# Altium footprint library Package_DFN_QFN.PcbLib: 735 footprints (part 20 of 46)
Each footprint in its own frame and in the unit in brackets; x right, y up, seen from the top. Pads: shape width x height; smd on the part's side, far side on the other; paste and mask are expansions set on the pad; w line width, h text height; cw(c..) or ccw(c..) is an arc to the next point about the centre after c.
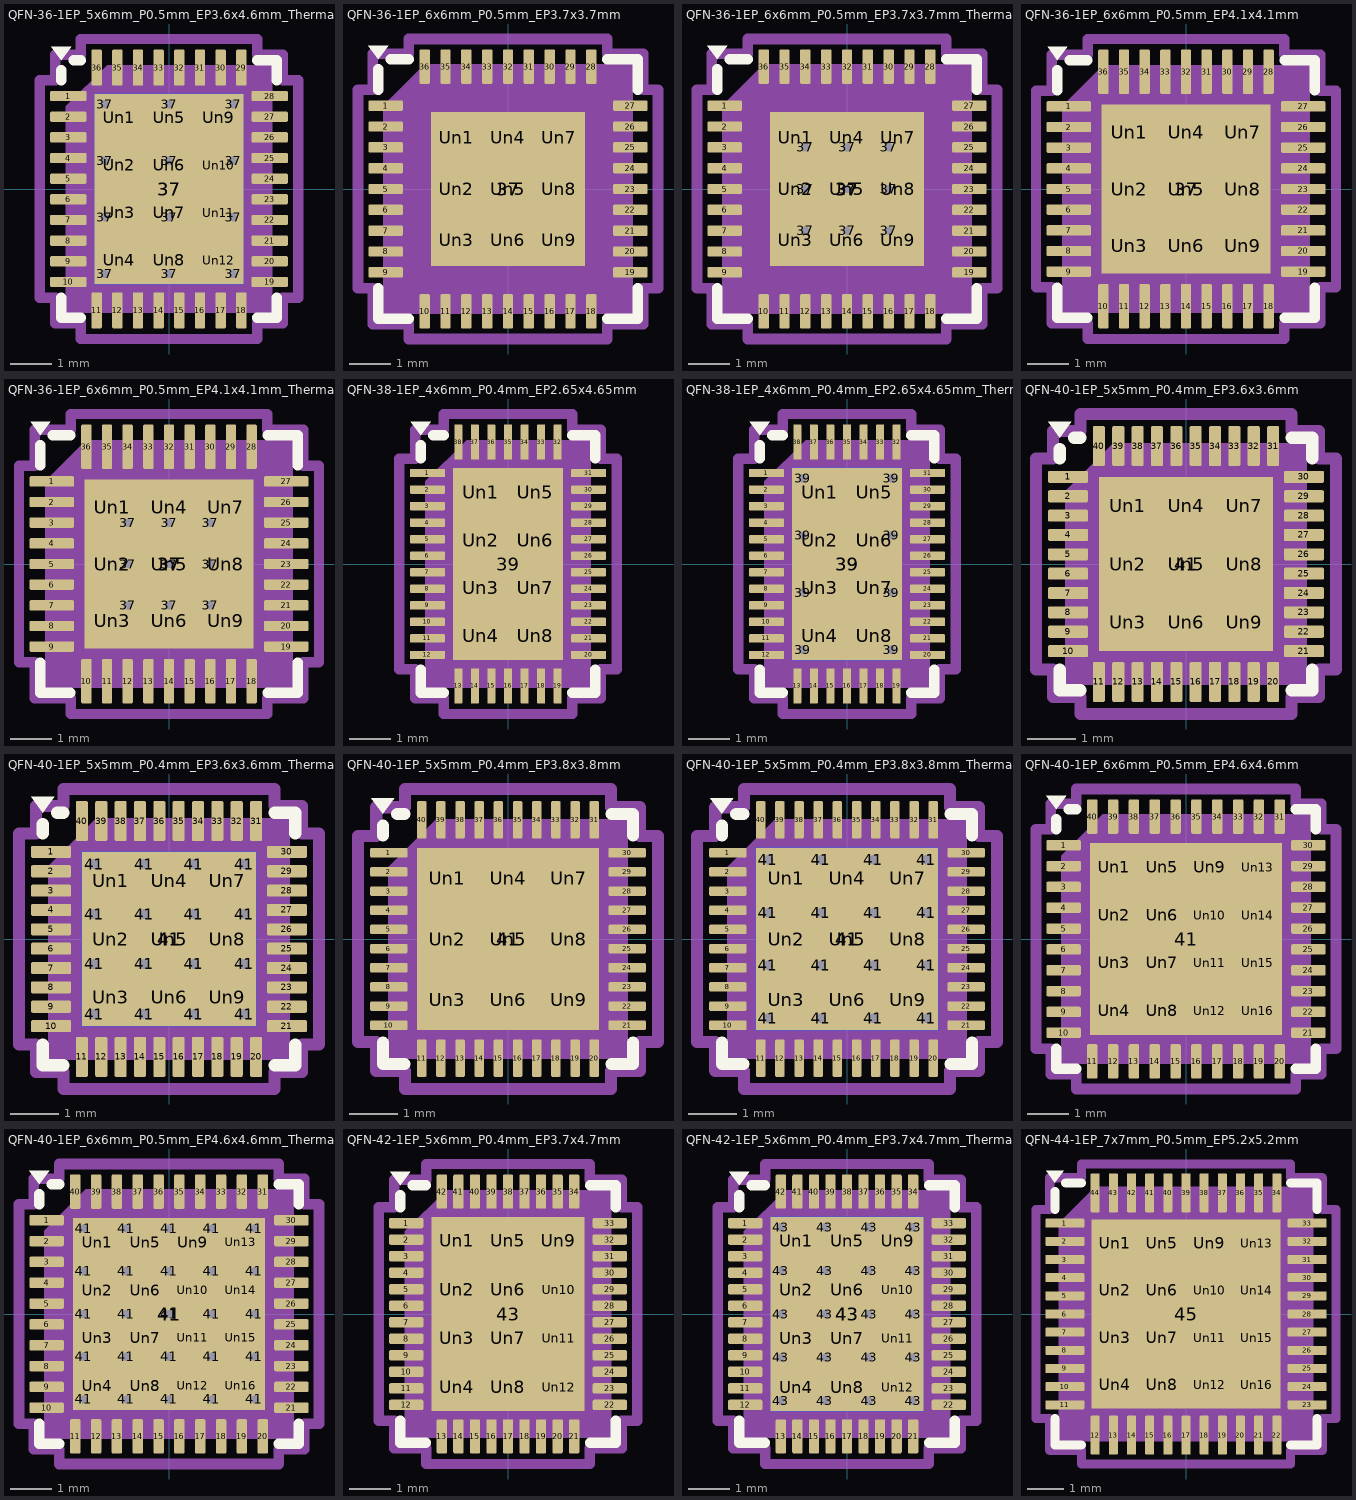
[diagram p19: the footprints below, top view; thin cyan lines are the x and y axes]

## QFN-36-1EP_5x6mm_P0.5mm_EP3.6x4.6mm_ThermalVias [mm] "QFN-36-1EP_5x6mm_P0.5mm_EP3.6x4.6mm_ThermalVias"
pads (62):
  rrect25% 0.875x0.25 smd: 1(-2.438,2.25) 2(-2.438,1.75) 3(-2.438,1.25) 4(-2.438,0.75) 5(-2.438,0.25) 6(-2.438,-0.25) 7(-2.438,-0.75) 8(-2.438,-1.25) 9(-2.438,-1.75) 10(-2.438,-2.25) 19(2.438,-2.25) 20(2.438,-1.75) 21(2.438,-1.25) 22(2.438,-0.75) 23(2.438,-0.25) 24(2.438,0.25) 25(2.438,0.75) 26(2.438,1.25) 27(2.438,1.75) 28(2.438,2.25)
  rrect25% 0.25x0.875 smd: 11(-1.75,-2.937) 12(-1.25,-2.937) 13(-0.75,-2.937) 14(-0.25,-2.937) 15(0.25,-2.937) 16(0.75,-2.937) 17(1.25,-2.937) 18(1.75,-2.937) 29(1.75,2.937) 30(1.25,2.937) 31(0.75,2.937) 32(0.25,2.937) 33(-0.25,2.937) 34(-0.75,2.937) 35(-1.25,2.937) 36(-1.75,2.937)
  round 0.5 hole 0.2: 37(-1.55,-2.05) 37(-1.55,-0.683) 37(-1.55,0.683) 37(-1.55,2.05) 37(0,-2.05) 37(0,-0.683) 37(0,0.683) 37(0,2.05) 37(1.55,-2.05) 37(1.55,-0.683) 37(1.55,0.683) 37(1.55,2.05)
  rect 3.6x4.6 smd: 37(0,0)
  rect 3.6x4.6 smd far side: 37(0,0)
  rrect25% 0.93x0.89 on Top Paste: Un1(-1.2,1.725) Un2(-1.2,0.575) Un3(-1.2,-0.575) Un4(-1.2,-1.725) Un5(0,1.725) Un6(0,0.575) Un7(0,-0.575) Un8(0,-1.725) Un9(1.2,1.725) Un10(1.2,0.575) Un11(1.2,-0.575) Un12(1.2,-1.725)
F.SilkS:
  region: -2.61,3.11 -2.85,3.44 -2.37,3.44
  lines w0.254: -2.61,-2.635 -2.61,-3.11 -2.135,-3.11 ; -2.61,2.635 -2.61,2.87 ; -2.31,3.11 -2.135,3.11 ; 2.135,-3.11 2.61,-3.11 2.61,-2.635 ; 2.135,3.11 2.61,3.11 2.61,2.635
Top Component Center:
  lines w0.127: -0.127,0 0.127,0 -0.127,0 ; 0,-0.127 0,0.127 0,-0.127
Top Assembly:
  region: 2.5,-3 -2.5,-3 -2.5,2 -1.5,3 2.5,3
Top Courtyard:
  lines w0.254: -3.13,-2.63 -3.13,2.63 -2.75,2.63 -2.75,3.25 -2.13,3.25 -2.13,3.63 2.13,3.63 2.13,3.25 2.75,3.25 2.75,2.63 3.13,2.63 3.13,-2.63 2.75,-2.63 2.75,-3.25 2.13,-3.25 2.13,-3.63 -2.13,-3.63 -2.13,-3.25 -2.75,-3.25 -2.75,-2.63 -3.13,-2.63
Top Designator:
  text ".Designator" at -3.43,-0.344 h1.52
3D body "QFN-36-1EP_5x6mm_P0.5mm_EP3.6x4.6mm.step": height 0.77, standoff 0, extent -2.5,-3 2.5,3

## QFN-36-1EP_6x6mm_P0.5mm_EP3.7x3.7mm [mm] "QFN-36-1EP_6x6mm_P0.5mm_EP3.7x3.7mm"
pads (46):
  rrect25% 0.825x0.25 smd: 1(-2.937,2) 2(-2.937,1.5) 3(-2.937,1) 4(-2.937,0.5) 5(-2.937,0) 6(-2.937,-0.5) 7(-2.937,-1) 8(-2.937,-1.5) 9(-2.937,-2) 19(2.937,-2) 20(2.937,-1.5) 21(2.937,-1) 22(2.937,-0.5) 23(2.937,0) 24(2.937,0.5) 25(2.937,1) 26(2.937,1.5) 27(2.937,2)
  rrect25% 0.25x0.825 smd: 10(-2,-2.937) 11(-1.5,-2.937) 12(-1,-2.937) 13(-0.5,-2.937) 14(0,-2.937) 15(0.5,-2.937) 16(1,-2.937) 17(1.5,-2.937) 18(2,-2.937) 28(2,2.937) 29(1.5,2.937) 30(1,2.937) 31(0.5,2.937) 32(0,2.937) 33(-0.5,2.937) 34(-1,2.937) 35(-1.5,2.937) 36(-2,2.937)
  rect 3.7x3.7 smd: 37(0,0)
  rrect25% 0.99x0.99 on Top Paste: Un1(-1.23,1.23) Un2(-1.23,0) Un3(-1.23,-1.23) Un4(0,1.23) Un5(0,0) Un6(0,-1.23) Un7(1.23,1.23) Un8(1.23,0) Un9(1.23,-1.23)
F.SilkS:
  region: -3.11,3.11 -3.35,3.44 -2.87,3.44
  lines w0.254: -3.11,-2.385 -3.11,-3.11 -2.385,-3.11 ; -3.11,2.385 -3.11,2.87 ; -2.81,3.11 -2.385,3.11 ; 2.385,-3.11 3.11,-3.11 3.11,-2.385 ; 2.385,3.11 3.11,3.11 3.11,2.385
Top Component Center:
  lines w0.127: -0.127,0 0.127,0 -0.127,0 ; 0,-0.127 0,0.127 0,-0.127
Top Assembly:
  region: 3,-3 -3,-3 -3,2 -2,3 3,3
Top Courtyard:
  lines w0.254: -3.6,-2.38 -3.25,-2.38 -3.25,-3.25 -2.38,-3.25 -2.38,-3.6 2.38,-3.6 2.38,-3.25 3.25,-3.25 3.25,-2.38 3.6,-2.38 3.6,2.38 3.25,2.38 3.25,3.25 2.38,3.25 2.38,3.6 -2.38,3.6 -2.38,3.25 -3.25,3.25 -3.25,2.38 -3.6,2.38 -3.6,-2.38
Top Designator:
  text ".Designator" at -3.43,-0.344 h1.52
3D body "QFN-36-1EP_6x6mm_P0.5mm_EP3.7x3.7mm.step": height 0.77, standoff 0, extent -3,-3 3,3

## QFN-36-1EP_6x6mm_P0.5mm_EP3.7x3.7mm_ThermalVias [mm] "QFN-36-1EP_6x6mm_P0.5mm_EP3.7x3.7mm_ThermalVias"
pads (56):
  rrect25% 0.825x0.25 smd: 1(-2.937,2) 2(-2.937,1.5) 3(-2.937,1) 4(-2.937,0.5) 5(-2.937,0) 6(-2.937,-0.5) 7(-2.937,-1) 8(-2.937,-1.5) 9(-2.937,-2) 19(2.937,-2) 20(2.937,-1.5) 21(2.937,-1) 22(2.937,-0.5) 23(2.937,0) 24(2.937,0.5) 25(2.937,1) 26(2.937,1.5) 27(2.937,2)
  rrect25% 0.25x0.825 smd: 10(-2,-2.937) 11(-1.5,-2.937) 12(-1,-2.937) 13(-0.5,-2.937) 14(0,-2.937) 15(0.5,-2.937) 16(1,-2.937) 17(1.5,-2.937) 18(2,-2.937) 28(2,2.937) 29(1.5,2.937) 30(1,2.937) 31(0.5,2.937) 32(0,2.937) 33(-0.5,2.937) 34(-1,2.937) 35(-1.5,2.937) 36(-2,2.937)
  round 0.5 hole 0.2: 37(-1,-1) 37(-1,0) 37(-1,1) 37(0,-1) 37(0,0) 37(0,1) 37(1,-1) 37(1,0) 37(1,1)
  rect 3.7x3.7 smd: 37(0,0)
  rect 2.5x2.5 smd far side: 37(0,0)
  rrect25% 0.99x0.99 on Top Paste: Un1(-1.23,1.23) Un2(-1.23,0) Un3(-1.23,-1.23) Un4(0,1.23) Un5(0,0) Un6(0,-1.23) Un7(1.23,1.23) Un8(1.23,0) Un9(1.23,-1.23)
F.SilkS:
  region: -3.11,3.11 -3.35,3.44 -2.87,3.44
  lines w0.254: -3.11,-2.385 -3.11,-3.11 -2.385,-3.11 ; -3.11,2.385 -3.11,2.87 ; -2.81,3.11 -2.385,3.11 ; 2.385,-3.11 3.11,-3.11 3.11,-2.385 ; 2.385,3.11 3.11,3.11 3.11,2.385
Top Component Center:
  lines w0.127: -0.127,0 0.127,0 -0.127,0 ; 0,-0.127 0,0.127 0,-0.127
Top Assembly:
  region: 3,-3 -3,-3 -3,2 -2,3 3,3
Top Courtyard:
  lines w0.254: -3.6,-2.38 -3.6,2.38 -3.25,2.38 -3.25,3.25 -2.38,3.25 -2.38,3.6 2.38,3.6 2.38,3.25 3.25,3.25 3.25,2.38 3.6,2.38 3.6,-2.38 3.25,-2.38 3.25,-3.25 2.38,-3.25 2.38,-3.6 -2.38,-3.6 -2.38,-3.25 -3.25,-3.25 -3.25,-2.38 -3.6,-2.38
Top Designator:
  text ".Designator" at -3.43,-0.344 h1.52
3D body "QFN-36-1EP_6x6mm_P0.5mm_EP3.7x3.7mm.step": height 0.77, standoff 0, extent -3,-3 3,3

## QFN-36-1EP_6x6mm_P0.5mm_EP4.1x4.1mm [mm] "QFN-36-1EP_6x6mm_P0.5mm_EP4.1x4.1mm"
pads (46):
  rrect25% 1.075x0.25 smd: 1(-2.838,2) 2(-2.838,1.5) 3(-2.838,1) 4(-2.838,0.5) 5(-2.838,0) 6(-2.838,-0.5) 7(-2.838,-1) 8(-2.838,-1.5) 9(-2.838,-2) 19(2.838,-2) 20(2.838,-1.5) 21(2.838,-1) 22(2.838,-0.5) 23(2.838,0) 24(2.838,0.5) 25(2.838,1) 26(2.838,1.5) 27(2.838,2)
  rrect25% 0.25x1.075 smd: 10(-2,-2.838) 11(-1.5,-2.838) 12(-1,-2.838) 13(-0.5,-2.838) 14(0,-2.838) 15(0.5,-2.838) 16(1,-2.838) 17(1.5,-2.838) 18(2,-2.838) 28(2,2.838) 29(1.5,2.838) 30(1,2.838) 31(0.5,2.838) 32(0,2.838) 33(-0.5,2.838) 34(-1,2.838) 35(-1.5,2.838) 36(-2,2.838)
  rect 4.1x4.1 smd: 37(0,0)
  rrect23% 1.1x1.1 on Top Paste: Un1(-1.37,1.37) Un2(-1.37,0) Un3(-1.37,-1.37) Un4(0,1.37) Un5(0,0) Un6(0,-1.37) Un7(1.37,1.37) Un8(1.37,0) Un9(1.37,-1.37)
F.SilkS:
  region: -3.11,3.11 -3.35,3.44 -2.87,3.44
  lines w0.254: -3.11,-2.385 -3.11,-3.11 -2.385,-3.11 ; -3.11,2.385 -3.11,2.87 ; -2.81,3.11 -2.385,3.11 ; 2.385,-3.11 3.11,-3.11 3.11,-2.385 ; 2.385,3.11 3.11,3.11 3.11,2.385
Top Component Center:
  lines w0.127: -0.127,0 0.127,0 -0.127,0 ; 0,-0.127 0,0.127 0,-0.127
Top Assembly:
  region: 3,-3 -3,-3 -3,2 -2,3 3,3
Top Courtyard:
  lines w0.254: -3.63,-2.38 -3.63,2.38 -3.25,2.38 -3.25,3.25 -2.38,3.25 -2.38,3.63 2.38,3.63 2.38,3.25 3.25,3.25 3.25,2.38 3.63,2.38 3.63,-2.38 3.25,-2.38 3.25,-3.25 2.38,-3.25 2.38,-3.63 -2.38,-3.63 -2.38,-3.25 -3.25,-3.25 -3.25,-2.38 -3.63,-2.38
Top Designator:
  text ".Designator" at -3.43,-0.344 h1.52
3D body "QFN-36-1EP_6x6mm_P0.5mm_EP3.7x3.7mm.step": height 0.77, standoff 0, extent -3,-3 3,3

## QFN-36-1EP_6x6mm_P0.5mm_EP4.1x4.1mm_ThermalVias [mm] "QFN-36-1EP_6x6mm_P0.5mm_EP4.1x4.1mm_ThermalVias"
pads (56):
  rrect25% 1.075x0.25 smd: 1(-2.838,2) 2(-2.838,1.5) 3(-2.838,1) 4(-2.838,0.5) 5(-2.838,0) 6(-2.838,-0.5) 7(-2.838,-1) 8(-2.838,-1.5) 9(-2.838,-2) 19(2.838,-2) 20(2.838,-1.5) 21(2.838,-1) 22(2.838,-0.5) 23(2.838,0) 24(2.838,0.5) 25(2.838,1) 26(2.838,1.5) 27(2.838,2)
  rrect25% 0.25x1.075 smd: 10(-2,-2.838) 11(-1.5,-2.838) 12(-1,-2.838) 13(-0.5,-2.838) 14(0,-2.838) 15(0.5,-2.838) 16(1,-2.838) 17(1.5,-2.838) 18(2,-2.838) 28(2,2.838) 29(1.5,2.838) 30(1,2.838) 31(0.5,2.838) 32(0,2.838) 33(-0.5,2.838) 34(-1,2.838) 35(-1.5,2.838) 36(-2,2.838)
  round 0.5 hole 0.2: 37(-1,-1) 37(-1,0) 37(-1,1) 37(0,-1) 37(0,0) 37(0,1) 37(1,-1) 37(1,0) 37(1,1)
  rect 4.1x4.1 smd: 37(0,0)
  rect 2.5x2.5 smd far side: 37(0,0)
  rrect23% 1.1x1.1 on Top Paste: Un1(-1.37,1.37) Un2(-1.37,0) Un3(-1.37,-1.37) Un4(0,1.37) Un5(0,0) Un6(0,-1.37) Un7(1.37,1.37) Un8(1.37,0) Un9(1.37,-1.37)
F.SilkS:
  region: -3.11,3.11 -3.35,3.44 -2.87,3.44
  lines w0.254: -3.11,-2.385 -3.11,-3.11 -2.385,-3.11 ; -3.11,2.385 -3.11,2.87 ; -2.81,3.11 -2.385,3.11 ; 2.385,-3.11 3.11,-3.11 3.11,-2.385 ; 2.385,3.11 3.11,3.11 3.11,2.385
Top Component Center:
  lines w0.127: -0.127,0 0.127,0 -0.127,0 ; 0,-0.127 0,0.127 0,-0.127
Top Assembly:
  region: 3,-3 -3,-3 -3,2 -2,3 3,3
Top Courtyard:
  lines w0.254: -3.63,-2.38 -3.63,2.38 -3.25,2.38 -3.25,3.25 -2.38,3.25 -2.38,3.63 2.38,3.63 2.38,3.25 3.25,3.25 3.25,2.38 3.63,2.38 3.63,-2.38 3.25,-2.38 3.25,-3.25 2.38,-3.25 2.38,-3.63 -2.38,-3.63 -2.38,-3.25 -3.25,-3.25 -3.25,-2.38 -3.63,-2.38
Top Designator:
  text ".Designator" at -3.43,-0.344 h1.52
3D body "QFN-36-1EP_6x6mm_P0.5mm_EP3.7x3.7mm.step": height 0.77, standoff 0, extent -3,-3 3,3

## QFN-38-1EP_4x6mm_P0.4mm_EP2.65x4.65mm [mm] "QFN-38-1EP_4x6mm_P0.4mm_EP2.65x4.65mm"
pads (47):
  rrect25% 0.85x0.2 smd: 1(-1.95,2.2) 2(-1.95,1.8) 3(-1.95,1.4) 4(-1.95,1) 5(-1.95,0.6) 6(-1.95,0.2) 7(-1.95,-0.2) 8(-1.95,-0.6) 9(-1.95,-1) 10(-1.95,-1.4) 11(-1.95,-1.8) 12(-1.95,-2.2) 20(1.95,-2.2) 21(1.95,-1.8) 22(1.95,-1.4) 23(1.95,-1) 24(1.95,-0.6) 25(1.95,-0.2) 26(1.95,0.2) 27(1.95,0.6) 28(1.95,1) 29(1.95,1.4) 30(1.95,1.8) 31(1.95,2.2)
  rrect25% 0.2x0.85 smd: 13(-1.2,-2.95) 14(-0.8,-2.95) 15(-0.4,-2.95) 16(0,-2.95) 17(0.4,-2.95) 18(0.8,-2.95) 19(1.2,-2.95) 32(1.2,2.95) 33(0.8,2.95) 34(0.4,2.95) 35(0,2.95) 36(-0.4,2.95) 37(-0.8,2.95) 38(-1.2,2.95)
  rect 2.65x4.65 smd: 39(0,0)
  rrect25% 1.07x0.94 on Top Paste: Un1(-0.66,1.74) Un2(-0.66,0.58) Un3(-0.66,-0.58) Un4(-0.66,-1.74) Un5(0.66,1.74) Un6(0.66,0.58) Un7(0.66,-0.58) Un8(0.66,-1.74)
F.SilkS:
  region: -2.11,3.11 -2.35,3.44 -1.87,3.44
  lines w0.254: -2.11,-2.56 -2.11,-3.11 -1.56,-3.11 ; -2.11,2.56 -2.11,2.87 ; -1.81,3.11 -1.56,3.11 ; 1.56,-3.11 2.11,-3.11 2.11,-2.56 ; 1.56,3.11 2.11,3.11 2.11,2.56
Top Component Center:
  lines w0.127: -0.127,0 0.127,0 -0.127,0 ; 0,-0.127 0,0.127 0,-0.127
Top Assembly:
  region: 2,-3 -2,-3 -2,2 -1,3 2,3
Top Courtyard:
  lines w0.254: -2.63,-2.55 -2.63,2.55 -2.25,2.55 -2.25,3.25 -1.55,3.25 -1.55,3.63 1.55,3.63 1.55,3.25 2.25,3.25 2.25,2.55 2.63,2.55 2.63,-2.55 2.25,-2.55 2.25,-3.25 1.55,-3.25 1.55,-3.63 -1.55,-3.63 -1.55,-3.25 -2.25,-3.25 -2.25,-2.55 -2.63,-2.55
Top Designator:
  text ".Designator" at -3.43,-0.344 h1.52
3D body "QFN-38-1EP_4x6mm_P0.4mm_EP2.65x4.65mm.step": height 0.77, standoff 0, extent -2,-3 2,3

## QFN-38-1EP_4x6mm_P0.4mm_EP2.65x4.65mm_ThermalVias [mm] "QFN-38-1EP_4x6mm_P0.4mm_EP2.65x4.65mm_ThermalVias"
pads (56):
  rrect25% 0.85x0.2 smd: 1(-1.95,2.2) 2(-1.95,1.8) 3(-1.95,1.4) 4(-1.95,1) 5(-1.95,0.6) 6(-1.95,0.2) 7(-1.95,-0.2) 8(-1.95,-0.6) 9(-1.95,-1) 10(-1.95,-1.4) 11(-1.95,-1.8) 12(-1.95,-2.2) 20(1.95,-2.2) 21(1.95,-1.8) 22(1.95,-1.4) 23(1.95,-1) 24(1.95,-0.6) 25(1.95,-0.2) 26(1.95,0.2) 27(1.95,0.6) 28(1.95,1) 29(1.95,1.4) 30(1.95,1.8) 31(1.95,2.2)
  rrect25% 0.2x0.85 smd: 13(-1.2,-2.95) 14(-0.8,-2.95) 15(-0.4,-2.95) 16(0,-2.95) 17(0.4,-2.95) 18(0.8,-2.95) 19(1.2,-2.95) 32(1.2,2.95) 33(0.8,2.95) 34(0.4,2.95) 35(0,2.95) 36(-0.4,2.95) 37(-0.8,2.95) 38(-1.2,2.95)
  round 0.5 hole 0.2: 39(-1.075,-2.075) 39(-1.075,-0.692) 39(-1.075,0.692) 39(-1.075,2.075) 39(1.075,-2.075) 39(1.075,-0.692) 39(1.075,0.692) 39(1.075,2.075)
  rect 2.65x4.65 smd: 39(0,0)
  rect 2.65x4.65 smd far side: 39(0,0)
  rrect25% 1.15x1.01 on Top Paste: Un1(-0.66,1.74) Un2(-0.66,0.58) Un3(-0.66,-0.58) Un4(-0.66,-1.74) Un5(0.66,1.74) Un6(0.66,0.58) Un7(0.66,-0.58) Un8(0.66,-1.74)
F.SilkS:
  region: -2.11,3.11 -2.35,3.44 -1.87,3.44
  lines w0.254: -2.11,-2.56 -2.11,-3.11 -1.56,-3.11 ; -2.11,2.56 -2.11,2.87 ; -1.81,3.11 -1.56,3.11 ; 1.56,-3.11 2.11,-3.11 2.11,-2.56 ; 1.56,3.11 2.11,3.11 2.11,2.56
Top Component Center:
  lines w0.127: -0.127,0 0.127,0 -0.127,0 ; 0,-0.127 0,0.127 0,-0.127
Top Assembly:
  region: 2,-3 -2,-3 -2,2 -1,3 2,3
Top Courtyard:
  lines w0.254: -2.63,-2.55 -2.63,2.55 -2.25,2.55 -2.25,3.25 -1.55,3.25 -1.55,3.63 1.55,3.63 1.55,3.25 2.25,3.25 2.25,2.55 2.63,2.55 2.63,-2.55 2.25,-2.55 2.25,-3.25 1.55,-3.25 1.55,-3.63 -1.55,-3.63 -1.55,-3.25 -2.25,-3.25 -2.25,-2.55 -2.63,-2.55
Top Designator:
  text ".Designator" at -3.43,-0.344 h1.52
3D body "QFN-38-1EP_4x6mm_P0.4mm_EP2.65x4.65mm.step": height 0.77, standoff 0, extent -2,-3 2,3

## QFN-40-1EP_5x5mm_P0.4mm_EP3.6x3.6mm [mm] "QFN-40-1EP_5x5mm_P0.4mm_EP3.6x3.6mm"
pads (50):
  rrect25% 0.825x0.25 smd: 1(-2.438,1.8) 2(-2.438,1.4) 3(-2.438,1) 4(-2.438,0.6) 5(-2.438,0.2) 6(-2.438,-0.2) 7(-2.438,-0.6) 8(-2.438,-1) 9(-2.438,-1.4) 10(-2.438,-1.8) 21(2.438,-1.8) 22(2.438,-1.4) 23(2.438,-1) 24(2.438,-0.6) 25(2.438,-0.2) 26(2.438,0.2) 27(2.438,0.6) 28(2.438,1) 29(2.438,1.4) 30(2.438,1.8)
  rrect25% 0.25x0.825 smd: 11(-1.8,-2.438) 12(-1.4,-2.438) 13(-1,-2.438) 14(-0.6,-2.438) 15(-0.2,-2.438) 16(0.2,-2.438) 17(0.6,-2.438) 18(1,-2.438) 19(1.4,-2.438) 20(1.8,-2.438) 31(1.8,2.438) 32(1.4,2.438) 33(1,2.438) 34(0.6,2.438) 35(0.2,2.438) 36(-0.2,2.438) 37(-0.6,2.438) 38(-1,2.438) 39(-1.4,2.438) 40(-1.8,2.438)
  rect 3.6x3.6 smd: 41(0,0)
  rrect25% 0.97x0.97 on Top Paste: Un1(-1.2,1.2) Un2(-1.2,0) Un3(-1.2,-1.2) Un4(0,1.2) Un5(0,0) Un6(0,-1.2) Un7(1.2,1.2) Un8(1.2,0) Un9(1.2,-1.2)
F.SilkS:
  region: -2.61,2.61 -2.85,2.94 -2.37,2.94
  lines w0.254: -2.61,-2.185 -2.61,-2.61 -2.185,-2.61 ; -2.61,2.185 -2.61,2.37 ; -2.31,2.61 -2.185,2.61 ; 2.185,-2.61 2.61,-2.61 2.61,-2.185 ; 2.185,2.61 2.61,2.61 2.61,2.185
Top Component Center:
  lines w0.127: -0.127,0 0.127,0 -0.127,0 ; 0,-0.127 0,0.127 0,-0.127
Top Assembly:
  region: 2.5,-2.5 -2.5,-2.5 -2.5,1.5 -1.5,2.5 2.5,2.5
Top Courtyard:
  lines w0.254: -3.1,-2.18 -3.1,2.18 -2.75,2.18 -2.75,2.75 -2.18,2.75 -2.18,3.1 2.18,3.1 2.18,2.75 2.75,2.75 2.75,2.18 3.1,2.18 3.1,-2.18 2.75,-2.18 2.75,-2.75 2.18,-2.75 2.18,-3.1 -2.18,-3.1 -2.18,-2.75 -2.75,-2.75 -2.75,-2.18 -3.1,-2.18
Top Designator:
  text ".Designator" at -3.43,-0.344 h1.52
3D body "QFN-40-1EP_5x5mm_P0.4mm_EP3.6x3.6mm.step": height 0.77, standoff 0, extent -2.5,-2.5 2.5,2.5

## QFN-40-1EP_5x5mm_P0.4mm_EP3.6x3.6mm_ThermalVias [mm] "QFN-40-1EP_5x5mm_P0.4mm_EP3.6x3.6mm_ThermalVias"
pads (67):
  rrect25% 0.825x0.25 smd: 1(-2.438,1.8) 2(-2.438,1.4) 3(-2.438,1) 4(-2.438,0.6) 5(-2.438,0.2) 6(-2.438,-0.2) 7(-2.438,-0.6) 8(-2.438,-1) 9(-2.438,-1.4) 10(-2.438,-1.8) 21(2.438,-1.8) 22(2.438,-1.4) 23(2.438,-1) 24(2.438,-0.6) 25(2.438,-0.2) 26(2.438,0.2) 27(2.438,0.6) 28(2.438,1) 29(2.438,1.4) 30(2.438,1.8)
  rrect25% 0.25x0.825 smd: 11(-1.8,-2.438) 12(-1.4,-2.438) 13(-1,-2.438) 14(-0.6,-2.438) 15(-0.2,-2.438) 16(0.2,-2.438) 17(0.6,-2.438) 18(1,-2.438) 19(1.4,-2.438) 20(1.8,-2.438) 31(1.8,2.438) 32(1.4,2.438) 33(1,2.438) 34(0.6,2.438) 35(0.2,2.438) 36(-0.2,2.438) 37(-0.6,2.438) 38(-1,2.438) 39(-1.4,2.438) 40(-1.8,2.438)
  round 0.5 hole 0.2: 41(-1.55,-1.55) 41(-1.55,-0.517) 41(-1.55,0.517) 41(-1.55,1.55) 41(-0.517,-1.55) 41(-0.517,-0.517) 41(-0.517,0.517) 41(-0.517,1.55) 41(0.517,-1.55) 41(0.517,-0.517) 41(0.517,0.517) 41(0.517,1.55) 41(1.55,-1.55) 41(1.55,-0.517) 41(1.55,0.517) 41(1.55,1.55)
  rect 3.6x3.6 smd: 41(0,0)
  rect 3.6x3.6 smd far side: 41(0,0)
  rrect25% 0.93x0.93 on Top Paste: Un1(-1.2,1.2) Un2(-1.2,0) Un3(-1.2,-1.2) Un4(0,1.2) Un5(0,0) Un6(0,-1.2) Un7(1.2,1.2) Un8(1.2,0) Un9(1.2,-1.2)
F.SilkS:
  region: -2.61,2.61 -2.85,2.94 -2.37,2.94
  lines w0.254: -2.61,-2.185 -2.61,-2.61 -2.185,-2.61 ; -2.61,2.185 -2.61,2.37 ; -2.31,2.61 -2.185,2.61 ; 2.185,-2.61 2.61,-2.61 2.61,-2.185 ; 2.185,2.61 2.61,2.61 2.61,2.185
Top Component Center:
  lines w0.127: -0.127,0 0.127,0 -0.127,0 ; 0,-0.127 0,0.127 0,-0.127
Top Assembly:
  region: 2.5,-2.5 -2.5,-2.5 -2.5,1.5 -1.5,2.5 2.5,2.5
Top Courtyard:
  lines w0.254: -3.1,-2.18 -3.1,2.18 -2.75,2.18 -2.75,2.75 -2.18,2.75 -2.18,3.1 2.18,3.1 2.18,2.75 2.75,2.75 2.75,2.18 3.1,2.18 3.1,-2.18 2.75,-2.18 2.75,-2.75 2.18,-2.75 2.18,-3.1 -2.18,-3.1 -2.18,-2.75 -2.75,-2.75 -2.75,-2.18 -3.1,-2.18
Top Designator:
  text ".Designator" at -3.43,-0.344 h1.52
3D body "QFN-40-1EP_5x5mm_P0.4mm_EP3.6x3.6mm.step": height 0.77, standoff 0, extent -2.5,-2.5 2.5,2.5

## QFN-40-1EP_5x5mm_P0.4mm_EP3.8x3.8mm [mm] "QFN-40-1EP_5x5mm_P0.4mm_EP3.8x3.8mm"
pads (50):
  rrect25% 0.775x0.2 smd: 1(-2.488,1.8) 2(-2.488,1.4) 3(-2.488,1) 4(-2.488,0.6) 5(-2.488,0.2) 6(-2.488,-0.2) 7(-2.488,-0.6) 8(-2.488,-1) 9(-2.488,-1.4) 10(-2.488,-1.8) 21(2.488,-1.8) 22(2.488,-1.4) 23(2.488,-1) 24(2.488,-0.6) 25(2.488,-0.2) 26(2.488,0.2) 27(2.488,0.6) 28(2.488,1) 29(2.488,1.4) 30(2.488,1.8)
  rrect25% 0.2x0.775 smd: 11(-1.8,-2.488) 12(-1.4,-2.488) 13(-1,-2.488) 14(-0.6,-2.488) 15(-0.2,-2.488) 16(0.2,-2.488) 17(0.6,-2.488) 18(1,-2.488) 19(1.4,-2.488) 20(1.8,-2.488) 31(1.8,2.488) 32(1.4,2.488) 33(1,2.488) 34(0.6,2.488) 35(0.2,2.488) 36(-0.2,2.488) 37(-0.6,2.488) 38(-1,2.488) 39(-1.4,2.488) 40(-1.8,2.488)
  rect 3.8x3.8 smd: 41(0,0)
  rrect25% 1.02x1.02 on Top Paste: Un1(-1.27,1.27) Un2(-1.27,0) Un3(-1.27,-1.27) Un4(0,1.27) Un5(0,0) Un6(0,-1.27) Un7(1.27,1.27) Un8(1.27,0) Un9(1.27,-1.27)
F.SilkS:
  region: -2.61,2.61 -2.85,2.94 -2.37,2.94
  lines w0.254: -2.61,-2.16 -2.61,-2.61 -2.16,-2.61 ; -2.61,2.16 -2.61,2.37 ; -2.31,2.61 -2.16,2.61 ; 2.16,-2.61 2.61,-2.61 2.61,-2.16 ; 2.16,2.61 2.61,2.61 2.61,2.16
Top Component Center:
  lines w0.127: -0.127,0 0.127,0 -0.127,0 ; 0,-0.127 0,0.127 0,-0.127
Top Assembly:
  region: 2.5,-2.5 -2.5,-2.5 -2.5,1.5 -1.5,2.5 2.5,2.5
Top Courtyard:
  lines w0.254: -3.13,-2.15 -3.13,2.15 -2.75,2.15 -2.75,2.75 -2.15,2.75 -2.15,3.13 2.15,3.13 2.15,2.75 2.75,2.75 2.75,2.15 3.13,2.15 3.13,-2.15 2.75,-2.15 2.75,-2.75 2.15,-2.75 2.15,-3.13 -2.15,-3.13 -2.15,-2.75 -2.75,-2.75 -2.75,-2.15 -3.13,-2.15
Top Designator:
  text ".Designator" at -3.43,-0.344 h1.52
3D body "QFN-40-1EP_5x5mm_P0.4mm_EP3.6x3.6mm.step": height 0.77, standoff 0, extent -2.5,-2.5 2.5,2.5

## QFN-40-1EP_5x5mm_P0.4mm_EP3.8x3.8mm_ThermalVias [mm] "QFN-40-1EP_5x5mm_P0.4mm_EP3.8x3.8mm_ThermalVias"
pads (67):
  rrect25% 0.775x0.2 smd: 1(-2.488,1.8) 2(-2.488,1.4) 3(-2.488,1) 4(-2.488,0.6) 5(-2.488,0.2) 6(-2.488,-0.2) 7(-2.488,-0.6) 8(-2.488,-1) 9(-2.488,-1.4) 10(-2.488,-1.8) 21(2.488,-1.8) 22(2.488,-1.4) 23(2.488,-1) 24(2.488,-0.6) 25(2.488,-0.2) 26(2.488,0.2) 27(2.488,0.6) 28(2.488,1) 29(2.488,1.4) 30(2.488,1.8)
  rrect25% 0.2x0.775 smd: 11(-1.8,-2.488) 12(-1.4,-2.488) 13(-1,-2.488) 14(-0.6,-2.488) 15(-0.2,-2.488) 16(0.2,-2.488) 17(0.6,-2.488) 18(1,-2.488) 19(1.4,-2.488) 20(1.8,-2.488) 31(1.8,2.488) 32(1.4,2.488) 33(1,2.488) 34(0.6,2.488) 35(0.2,2.488) 36(-0.2,2.488) 37(-0.6,2.488) 38(-1,2.488) 39(-1.4,2.488) 40(-1.8,2.488)
  round 0.5 hole 0.2: 41(-1.65,-1.65) 41(-1.65,-0.55) 41(-1.65,0.55) 41(-1.65,1.65) 41(-0.55,-1.65) 41(-0.55,-0.55) 41(-0.55,0.55) 41(-0.55,1.65) 41(0.55,-1.65) 41(0.55,-0.55) 41(0.55,0.55) 41(0.55,1.65) 41(1.65,-1.65) 41(1.65,-0.55) 41(1.65,0.55) 41(1.65,1.65)
  rect 3.8x3.8 smd: 41(0,0)
  rect 3.8x3.8 smd far side: 41(0,0)
  rrect25% 0.98x0.98 on Top Paste: Un1(-1.27,1.27) Un2(-1.27,0) Un3(-1.27,-1.27) Un4(0,1.27) Un5(0,0) Un6(0,-1.27) Un7(1.27,1.27) Un8(1.27,0) Un9(1.27,-1.27)
F.SilkS:
  region: -2.61,2.61 -2.85,2.94 -2.37,2.94
  lines w0.254: -2.61,-2.16 -2.61,-2.61 -2.16,-2.61 ; -2.61,2.16 -2.61,2.37 ; -2.31,2.61 -2.16,2.61 ; 2.16,-2.61 2.61,-2.61 2.61,-2.16 ; 2.16,2.61 2.61,2.61 2.61,2.16
Top Component Center:
  lines w0.127: -0.127,0 0.127,0 -0.127,0 ; 0,-0.127 0,0.127 0,-0.127
Top Assembly:
  region: 2.5,-2.5 -2.5,-2.5 -2.5,1.5 -1.5,2.5 2.5,2.5
Top Courtyard:
  lines w0.254: -3.13,-2.15 -3.13,2.15 -2.75,2.15 -2.75,2.75 -2.15,2.75 -2.15,3.13 2.15,3.13 2.15,2.75 2.75,2.75 2.75,2.15 3.13,2.15 3.13,-2.15 2.75,-2.15 2.75,-2.75 2.15,-2.75 2.15,-3.13 -2.15,-3.13 -2.15,-2.75 -2.75,-2.75 -2.75,-2.15 -3.13,-2.15
Top Designator:
  text ".Designator" at -3.43,-0.344 h1.52
3D body "QFN-40-1EP_5x5mm_P0.4mm_EP3.6x3.6mm.step": height 0.77, standoff 0, extent -2.5,-2.5 2.5,2.5

## QFN-40-1EP_6x6mm_P0.5mm_EP4.6x4.6mm [mm] "QFN-40-1EP_6x6mm_P0.5mm_EP4.6x4.6mm"
pads (57):
  rrect25% 0.825x0.25 smd: 1(-2.937,2.25) 2(-2.937,1.75) 3(-2.937,1.25) 4(-2.937,0.75) 5(-2.937,0.25) 6(-2.937,-0.25) 7(-2.937,-0.75) 8(-2.937,-1.25) 9(-2.937,-1.75) 10(-2.937,-2.25) 21(2.937,-2.25) 22(2.937,-1.75) 23(2.937,-1.25) 24(2.937,-0.75) 25(2.937,-0.25) 26(2.937,0.25) 27(2.937,0.75) 28(2.937,1.25) 29(2.937,1.75) 30(2.937,2.25)
  rrect25% 0.25x0.825 smd: 11(-2.25,-2.937) 12(-1.75,-2.937) 13(-1.25,-2.937) 14(-0.75,-2.937) 15(-0.25,-2.937) 16(0.25,-2.937) 17(0.75,-2.937) 18(1.25,-2.937) 19(1.75,-2.937) 20(2.25,-2.937) 31(2.25,2.937) 32(1.75,2.937) 33(1.25,2.937) 34(0.75,2.937) 35(0.25,2.937) 36(-0.25,2.937) 37(-0.75,2.937) 38(-1.25,2.937) 39(-1.75,2.937) 40(-2.25,2.937)
  rect 4.6x4.6 smd: 41(0,0)
  rrect25% 0.93x0.93 on Top Paste: Un1(-1.725,1.725) Un2(-1.725,0.575) Un3(-1.725,-0.575) Un4(-1.725,-1.725) Un5(-0.575,1.725) Un6(-0.575,0.575) Un7(-0.575,-0.575) Un8(-0.575,-1.725) Un9(0.575,1.725) Un10(0.575,0.575) Un11(0.575,-0.575) Un12(0.575,-1.725) Un13(1.725,1.725) Un14(1.725,0.575) Un15(1.725,-0.575) Un16(1.725,-1.725)
F.SilkS:
  region: -3.11,3.11 -3.35,3.44 -2.87,3.44
  lines w0.254: -3.11,-2.635 -3.11,-3.11 -2.635,-3.11 ; -3.11,2.635 -3.11,2.87 ; -2.81,3.11 -2.635,3.11 ; 2.635,-3.11 3.11,-3.11 3.11,-2.635 ; 2.635,3.11 3.11,3.11 3.11,2.635
Top Component Center:
  lines w0.127: -0.127,0 0.127,0 -0.127,0 ; 0,-0.127 0,0.127 0,-0.127
Top Assembly:
  region: 3,-3 -3,-3 -3,2 -2,3 3,3
Top Courtyard:
  lines w0.254: -3.6,-2.63 -3.6,2.63 -3.25,2.63 -3.25,3.25 -2.63,3.25 -2.63,3.6 2.63,3.6 2.63,3.25 3.25,3.25 3.25,2.63 3.6,2.63 3.6,-2.63 3.25,-2.63 3.25,-3.25 2.63,-3.25 2.63,-3.6 -2.63,-3.6 -2.63,-3.25 -3.25,-3.25 -3.25,-2.63 -3.6,-2.63
Top Designator:
  text ".Designator" at -3.43,-0.344 h1.52
3D body "QFN-40-1EP_6x6mm_P0.5mm_EP4.6x4.6mm.step": height 1, standoff 0, extent -3,-3 3,3

## QFN-40-1EP_6x6mm_P0.5mm_EP4.6x4.6mm_ThermalVias [mm] "QFN-40-1EP_6x6mm_P0.5mm_EP4.6x4.6mm_ThermalVias"
pads (83):
  rrect25% 0.825x0.25 smd: 1(-2.937,2.25) 2(-2.937,1.75) 3(-2.937,1.25) 4(-2.937,0.75) 5(-2.937,0.25) 6(-2.937,-0.25) 7(-2.937,-0.75) 8(-2.937,-1.25) 9(-2.937,-1.75) 10(-2.937,-2.25) 21(2.937,-2.25) 22(2.937,-1.75) 23(2.937,-1.25) 24(2.937,-0.75) 25(2.937,-0.25) 26(2.937,0.25) 27(2.937,0.75) 28(2.937,1.25) 29(2.937,1.75) 30(2.937,2.25)
  rrect25% 0.25x0.825 smd: 11(-2.25,-2.937) 12(-1.75,-2.937) 13(-1.25,-2.937) 14(-0.75,-2.937) 15(-0.25,-2.937) 16(0.25,-2.937) 17(0.75,-2.937) 18(1.25,-2.937) 19(1.75,-2.937) 20(2.25,-2.937) 31(2.25,2.937) 32(1.75,2.937) 33(1.25,2.937) 34(0.75,2.937) 35(0.25,2.937) 36(-0.25,2.937) 37(-0.75,2.937) 38(-1.25,2.937) 39(-1.75,2.937) 40(-2.25,2.937)
  round 0.5 hole 0.2: 41(-2.05,-2.05) 41(-2.05,-1.025) 41(-2.05,0) 41(-2.05,1.025) 41(-2.05,2.05) 41(-1.025,-2.05) 41(-1.025,-1.025) 41(-1.025,0) 41(-1.025,1.025) 41(-1.025,2.05) 41(0,-2.05) 41(0,-1.025) 41(0,0) 41(0,1.025) 41(0,2.05) 41(1.025,-2.05) 41(1.025,-1.025) 41(1.025,0) 41(1.025,1.025) 41(1.025,2.05) 41(2.05,-2.05) 41(2.05,-1.025) 41(2.05,0) 41(2.05,1.025) 41(2.05,2.05)
  rect 4.6x4.6 smd: 41(0,0)
  rect 4.6x4.6 smd far side: 41(0,0)
  rrect25% 0.89x0.89 on Top Paste: Un1(-1.725,1.725) Un2(-1.725,0.575) Un3(-1.725,-0.575) Un4(-1.725,-1.725) Un5(-0.575,1.725) Un6(-0.575,0.575) Un7(-0.575,-0.575) Un8(-0.575,-1.725) Un9(0.575,1.725) Un10(0.575,0.575) Un11(0.575,-0.575) Un12(0.575,-1.725) Un13(1.725,1.725) Un14(1.725,0.575) Un15(1.725,-0.575) Un16(1.725,-1.725)
F.SilkS:
  region: -3.11,3.11 -3.35,3.44 -2.87,3.44
  lines w0.254: -3.11,-2.635 -3.11,-3.11 -2.635,-3.11 ; -3.11,2.635 -3.11,2.87 ; -2.81,3.11 -2.635,3.11 ; 2.635,-3.11 3.11,-3.11 3.11,-2.635 ; 2.635,3.11 3.11,3.11 3.11,2.635
Top Component Center:
  lines w0.127: -0.127,0 0.127,0 -0.127,0 ; 0,-0.127 0,0.127 0,-0.127
Top Assembly:
  region: 3,-3 -3,-3 -3,2 -2,3 3,3
Top Courtyard:
  lines w0.254: -3.6,-2.63 -3.6,2.63 -3.25,2.63 -3.25,3.25 -2.63,3.25 -2.63,3.6 2.63,3.6 2.63,3.25 3.25,3.25 3.25,2.63 3.6,2.63 3.6,-2.63 3.25,-2.63 3.25,-3.25 2.63,-3.25 2.63,-3.6 -2.63,-3.6 -2.63,-3.25 -3.25,-3.25 -3.25,-2.63 -3.6,-2.63
Top Designator:
  text ".Designator" at -3.43,-0.344 h1.52
3D body "QFN-40-1EP_6x6mm_P0.5mm_EP4.6x4.6mm.step": height 1, standoff 0, extent -3,-3 3,3

## QFN-42-1EP_5x6mm_P0.4mm_EP3.7x4.7mm [mm] "QFN-42-1EP_5x6mm_P0.4mm_EP3.7x4.7mm"
pads (55):
  rrect25% 0.825x0.25 smd: 1(-2.462,2.2) 2(-2.462,1.8) 3(-2.462,1.4) 4(-2.462,1) 5(-2.462,0.6) 6(-2.462,0.2) 7(-2.462,-0.2) 8(-2.462,-0.6) 9(-2.462,-1) 10(-2.462,-1.4) 11(-2.462,-1.8) 12(-2.462,-2.2) 22(2.462,-2.2) 23(2.462,-1.8) 24(2.462,-1.4) 25(2.462,-1) 26(2.462,-0.6) 27(2.462,-0.2) 28(2.462,0.2) 29(2.462,0.6) 30(2.462,1) 31(2.462,1.4) 32(2.462,1.8) 33(2.462,2.2)
  rrect25% 0.25x0.825 smd: 13(-1.6,-2.963) 14(-1.2,-2.963) 15(-0.8,-2.963) 16(-0.4,-2.963) 17(0,-2.963) 18(0.4,-2.963) 19(0.8,-2.963) 20(1.2,-2.963) 21(1.6,-2.963) 34(1.6,2.963) 35(1.2,2.963) 36(0.8,2.963) 37(0.4,2.963) 38(0,2.963) 39(-0.4,2.963) 40(-0.8,2.963) 41(-1.2,2.963) 42(-1.6,2.963)
  rect 3.7x4.7 smd: 43(0,0)
  rrect25% 0.99x0.95 on Top Paste: Un1(-1.23,1.77) Un2(-1.23,0.59) Un3(-1.23,-0.59) Un4(-1.23,-1.77) Un5(0,1.77) Un6(0,0.59) Un7(0,-0.59) Un8(0,-1.77) Un9(1.23,1.77) Un10(1.23,0.59) Un11(1.23,-0.59) Un12(1.23,-1.77)
F.SilkS:
  region: -2.61,3.11 -2.85,3.44 -2.37,3.44
  lines w0.254: -2.61,-2.585 -2.61,-3.11 -1.985,-3.11 ; -2.61,2.585 -2.61,2.87 ; -2.31,3.11 -1.985,3.11 ; 1.985,-3.11 2.61,-3.11 2.61,-2.585 ; 1.985,3.11 2.61,3.11 2.61,2.585
Top Component Center:
  lines w0.127: -0.127,0 0.127,0 -0.127,0 ; 0,-0.127 0,0.127 0,-0.127
Top Assembly:
  region: 2.5,-3 -2.5,-3 -2.5,2 -1.5,3 2.5,3
Top Courtyard:
  lines w0.254: -3.13,-2.58 -3.13,2.58 -2.75,2.58 -2.75,3.25 -1.98,3.25 -1.98,3.63 1.98,3.63 1.98,3.25 2.75,3.25 2.75,2.58 3.13,2.58 3.13,-2.58 2.75,-2.58 2.75,-3.25 1.98,-3.25 1.98,-3.63 -1.98,-3.63 -1.98,-3.25 -2.75,-3.25 -2.75,-2.58 -3.13,-2.58
Top Designator:
  text ".Designator" at -3.43,-0.344 h1.52
3D body "QFN-42-1EP_5x6mm_P0.4mm_EP3.7x4.7mm.step": height 1, standoff 0, extent -2.5,-3 2.5,3

## QFN-42-1EP_5x6mm_P0.4mm_EP3.7x4.7mm_ThermalVias [mm] "QFN-42-1EP_5x6mm_P0.4mm_EP3.7x4.7mm_ThermalVias"
pads (76):
  rrect25% 0.825x0.25 smd: 1(-2.462,2.2) 2(-2.462,1.8) 3(-2.462,1.4) 4(-2.462,1) 5(-2.462,0.6) 6(-2.462,0.2) 7(-2.462,-0.2) 8(-2.462,-0.6) 9(-2.462,-1) 10(-2.462,-1.4) 11(-2.462,-1.8) 12(-2.462,-2.2) 22(2.462,-2.2) 23(2.462,-1.8) 24(2.462,-1.4) 25(2.462,-1) 26(2.462,-0.6) 27(2.462,-0.2) 28(2.462,0.2) 29(2.462,0.6) 30(2.462,1) 31(2.462,1.4) 32(2.462,1.8) 33(2.462,2.2)
  rrect25% 0.25x0.825 smd: 13(-1.6,-2.963) 14(-1.2,-2.963) 15(-0.8,-2.963) 16(-0.4,-2.963) 17(0,-2.963) 18(0.4,-2.963) 19(0.8,-2.963) 20(1.2,-2.963) 21(1.6,-2.963) 34(1.6,2.963) 35(1.2,2.963) 36(0.8,2.963) 37(0.4,2.963) 38(0,2.963) 39(-0.4,2.963) 40(-0.8,2.963) 41(-1.2,2.963) 42(-1.6,2.963)
  round 0.5 hole 0.2: 43(-1.6,-2.1) 43(-1.6,-1.05) 43(-1.6,0) 43(-1.6,1.05) 43(-1.6,2.1) 43(-0.533,-2.1) 43(-0.533,-1.05) 43(-0.533,0) 43(-0.533,1.05) 43(-0.533,2.1) 43(0.533,-2.1) 43(0.533,-1.05) 43(0.533,0) 43(0.533,1.05) 43(0.533,2.1) 43(1.6,-2.1) 43(1.6,-1.05) 43(1.6,0) 43(1.6,1.05) 43(1.6,2.1)
  rect 3.7x4.7 smd: 43(0,0)
  rect 3.7x4.7 smd far side: 43(0,0)
  rrect25% 0.96x0.91 on Top Paste: Un1(-1.23,1.77) Un2(-1.23,0.59) Un3(-1.23,-0.59) Un4(-1.23,-1.77) Un5(0,1.77) Un6(0,0.59) Un7(0,-0.59) Un8(0,-1.77) Un9(1.23,1.77) Un10(1.23,0.59) Un11(1.23,-0.59) Un12(1.23,-1.77)
F.SilkS:
  region: -2.61,3.11 -2.85,3.44 -2.37,3.44
  lines w0.254: -2.61,-2.585 -2.61,-3.11 -1.985,-3.11 ; -2.61,2.585 -2.61,2.87 ; -2.31,3.11 -1.985,3.11 ; 1.985,-3.11 2.61,-3.11 2.61,-2.585 ; 1.985,3.11 2.61,3.11 2.61,2.585
Top Component Center:
  lines w0.127: -0.127,0 0.127,0 -0.127,0 ; 0,-0.127 0,0.127 0,-0.127
Top Assembly:
  region: 2.5,-3 -2.5,-3 -2.5,2 -1.5,3 2.5,3
Top Courtyard:
  lines w0.254: -3.13,-2.58 -3.13,2.58 -2.75,2.58 -2.75,3.25 -1.98,3.25 -1.98,3.63 1.98,3.63 1.98,3.25 2.75,3.25 2.75,2.58 3.13,2.58 3.13,-2.58 2.75,-2.58 2.75,-3.25 1.98,-3.25 1.98,-3.63 -1.98,-3.63 -1.98,-3.25 -2.75,-3.25 -2.75,-2.58 -3.13,-2.58
Top Designator:
  text ".Designator" at -3.43,-0.344 h1.52
3D body "QFN-42-1EP_5x6mm_P0.4mm_EP3.7x4.7mm.step": height 1, standoff 0, extent -2.5,-3 2.5,3

## QFN-44-1EP_7x7mm_P0.5mm_EP5.2x5.2mm [mm] "QFN-44-1EP_7x7mm_P0.5mm_EP5.2x5.2mm"
pads (61):
  rrect25% 1.075x0.25 smd: 1(-3.337,2.5) 2(-3.337,2) 3(-3.337,1.5) 4(-3.337,1) 5(-3.337,0.5) 6(-3.337,0) 7(-3.337,-0.5) 8(-3.337,-1) 9(-3.337,-1.5) 10(-3.337,-2) 11(-3.337,-2.5) 23(3.337,-2.5) 24(3.337,-2) 25(3.337,-1.5) 26(3.337,-1) 27(3.337,-0.5) 28(3.337,0) 29(3.337,0.5) 30(3.337,1) 31(3.337,1.5) 32(3.337,2) 33(3.337,2.5)
  rrect25% 0.25x1.075 smd: 12(-2.5,-3.337) 13(-2,-3.337) 14(-1.5,-3.337) 15(-1,-3.337) 16(-0.5,-3.337) 17(0,-3.337) 18(0.5,-3.337) 19(1,-3.337) 20(1.5,-3.337) 21(2,-3.337) 22(2.5,-3.337) 34(2.5,3.337) 35(2,3.337) 36(1.5,3.337) 37(1,3.337) 38(0.5,3.337) 39(0,3.337) 40(-0.5,3.337) 41(-1,3.337) 42(-1.5,3.337) 43(-2,3.337) 44(-2.5,3.337)
  rect 5.2x5.2 smd: 45(0,0)
  rrect24% 1.05x1.05 on Top Paste: Un1(-1.95,1.95) Un2(-1.95,0.65) Un3(-1.95,-0.65) Un4(-1.95,-1.95) Un5(-0.65,1.95) Un6(-0.65,0.65) Un7(-0.65,-0.65) Un8(-0.65,-1.95) Un9(0.65,1.95) Un10(0.65,0.65) Un11(0.65,-0.65) Un12(0.65,-1.95) Un13(1.95,1.95) Un14(1.95,0.65) Un15(1.95,-0.65) Un16(1.95,-1.95)
F.SilkS:
  region: -3.61,3.61 -3.85,3.94 -3.37,3.94
  lines w0.254: -3.61,-2.885 -3.61,-3.61 -2.885,-3.61 ; -3.61,2.885 -3.61,3.37 ; -3.31,3.61 -2.885,3.61 ; 2.885,-3.61 3.61,-3.61 3.61,-2.885 ; 2.885,3.61 3.61,3.61 3.61,2.885
Top Component Center:
  lines w0.127: -0.127,0 0.127,0 -0.127,0 ; 0,-0.127 0,0.127 0,-0.127
Top Assembly:
  region: 3.5,-3.5 -3.5,-3.5 -3.5,2.5 -2.5,3.5 3.5,3.5
Top Courtyard:
  lines w0.254: -4.13,-2.88 -4.13,2.88 -3.75,2.88 -3.75,3.75 -2.88,3.75 -2.88,4.13 2.88,4.13 2.88,3.75 3.75,3.75 3.75,2.88 4.13,2.88 4.13,-2.88 3.75,-2.88 3.75,-3.75 2.88,-3.75 2.88,-4.13 -2.88,-4.13 -2.88,-3.75 -3.75,-3.75 -3.75,-2.88 -4.13,-2.88
Top Designator:
  text ".Designator" at -3.43,-0.344 h1.52
3D body "QFN-44-1EP_7x7mm_P0.5mm_EP5.15x5.15mm.step": height 0.77, standoff 0, extent -3.5,-3.5 3.5,3.5